# EAGLE library part NRF24 (library c64-rx)
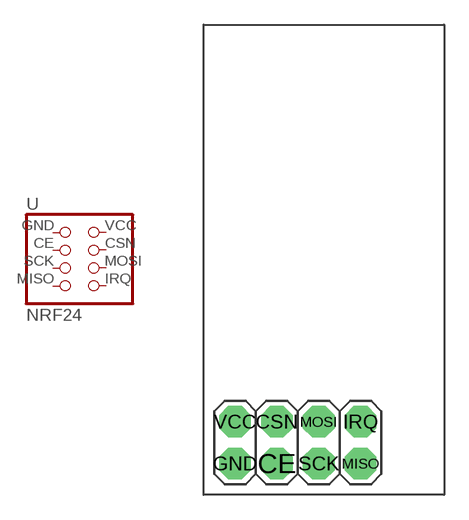
[diagram p3: symbol with the pads of NRF24; footprint NRF24]

Designator prefix -

## NRF24  [NRF24]
CE  CE  pas
CSN  CSN  pas
GND  GND  pas
IRQ  IRQ  pas
MISO  MISO  pas
MOSI  MOSI  pas
SCK  SCK  pas
VCC  VCC  pas

## Footprint NRF24 (pad centres in mm)
drill 0.9 pad 1.93 octagon: CE 3.81,-1.27; CSN 3.81,1.27; GND 1.27,-1.27; IRQ 8.89,1.27; MISO 8.89,-1.27; MOSI 6.35,1.27; SCK 6.35,-1.27; VCC 1.27,1.27